# Altium footprint library SODFL1608X77N.PcbLib: 1 footprints
Each footprint in its own frame and in the unit in brackets; x right, y up, seen from the top. Pads: shape width x height; smd on the part's side, far side on the other; paste and mask are expansions set on the pad; w line width, h text height; cw(c..) or ccw(c..) is an arc to the next point about the centre after c.
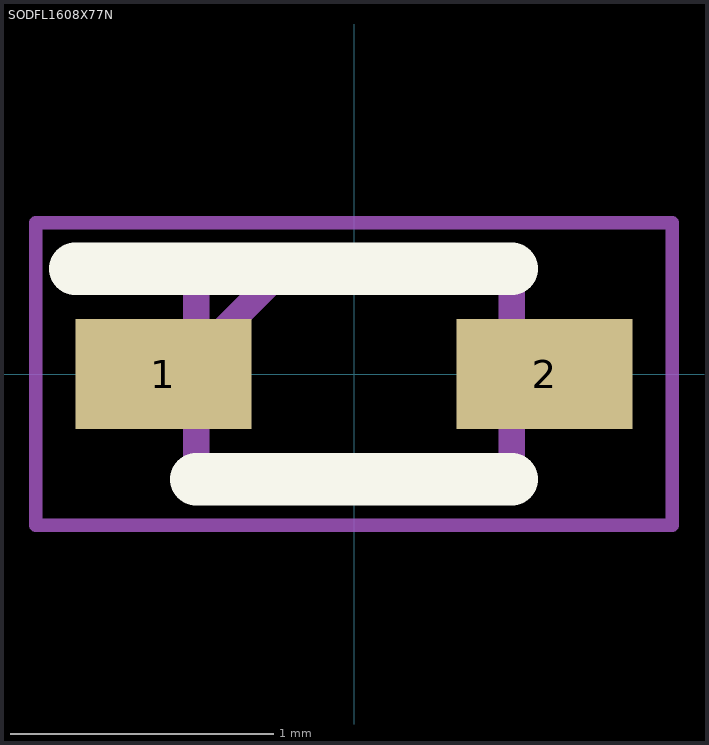
[diagram p0: the footprint, top view; thin cyan lines are the x and y axes]

## SODFL1608X77N [mm]
pads (2):
  rect 0.67x0.42 smd: 1(-0.725,0) 2(0.725,0)
Top Overlay:
  lines w0.2: -1.06,0.4 0.6,0.4 ; -0.6,-0.4 0.6,-0.4
  text "." at 0.889,0.381 h0.25
Mechanical 15:
  lines w0.1: -0.6,0.065 -0.265,0.4 ; -0.6,-0.4 -0.6,0.4 0.6,0.4 0.6,-0.4 -0.6,-0.4
Mechanical 20:
  lines w0.05: -1.21,-0.575 -1.21,0.575 1.21,0.575 1.21,-0.575 -1.21,-0.575
3D body "TPD1E10B06DYAR.stp": height 0.77, standoff 0, extent -0.8,-0.4 0.8,0.4